# Altium footprint library Battery Holder.PcbLib: 4 footprints
Each footprint in its own frame and in the unit in brackets; x right, y up, seen from the top. Pads: shape width x height; smd on the part's side, far side on the other; paste and mask are expansions set on the pad; w line width, h text height; cw(c..) or ccw(c..) is an arc to the next point about the centre after c.
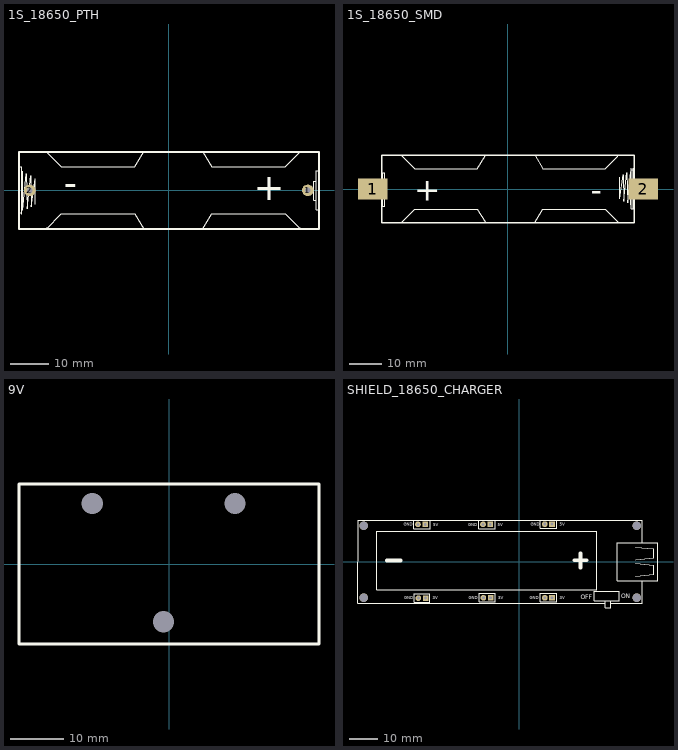
[diagram p0: the footprints below, top view; thin cyan lines are the x and y axes]

## 1S_18650_PTH [mm] "Battery 18650 Holder for 1 Cell, PTH Version"
pads (2):
  round 3 hole 1.5: 1(36.138,0.003) 2(-36.138,-0.003)
Top Overlay:
  lines w0.254: -38.74,-6.22 -38.74,6.099 -38.232,6.099 -38.232,-6.22 ; -38.74,-5.839 -38.232,-5.839 ; -37.978,4.956 -37.978,-5.204 -37.089,4.321 -36.835,-4.823 -35.819,3.813 -35.692,-4.315 -34.676,3.051 -34.676,-3.553 ; -31.755,-9.926 -27.945,-6.116 -8.851,-6.116 -6.482,-10.03 ; -31.755,9.933 -27.945,6.123 -8.851,6.123 -6.482,10.036 ; 8.802,-10.006 11.171,-6.093 30.265,-6.093 34.075,-9.903 ; 8.802,10.013 11.171,6.099 30.265,6.099 34.075,9.909 ; 37.714,-2.537 37.714,2.416 38.349,2.416 38.349,-2.537 37.714,-2.537 ; 38.349,-5.077 38.349,5.083 38.984,5.083 38.984,-5.077 38.349,-5.077
  lines w0.508: -31.755,-10.03 -31.755,-9.926 ; -31.755,9.933 -31.755,10.036 ; 34.075,-10.006 34.075,-9.903 ; 34.075,9.909 34.075,10.013 ; -38.932,-10.036 -38.932,10.03 39.046,10.03 39.046,-10.036 -38.932,-10.036
  text "-" at -23.737,3.747 h7
  text "+" at 30.111,3.446 h7
3D body "1s_18650_PTH.stp": height 21.5, standoff -3.99, extent -38.954,-10.003 39.046,9.997

## 1S_18650_SMD [mm] "Battery 18650 Holder for 1 Cell, SMD Version"
pads (2):
  rect 9x6.35 smd: 1(-41.33,0) 2(41.33,0)
Top Overlay:
  lines w0.254: -32.267,-10.073 -32.267,-9.969 -28.457,-6.159 -9.363,-6.159 -6.994,-10.073 ; -32.267,10.12 -32.267,10.016 -28.457,6.206 -9.363,6.206 -6.994,10.12 ; 8.29,-10.05 10.659,-6.136 29.753,-6.136 33.563,-9.946 33.563,-10.05 ; 8.29,10.097 10.659,6.183 29.753,6.183 33.563,9.993 33.563,10.097 ; 34.148,3.627 34.148,-2.977 35.164,4.389 35.291,-3.739 36.307,4.897 36.561,-4.247 37.45,5.278 37.45,-4.882 ; 37.704,5.913 38.212,5.913 ; 37.704,6.294 37.704,-6.025 38.212,-6.025 38.212,6.294 ; -38.242,-5.263 -37.607,-5.263 -37.607,4.897 -38.242,4.897 -38.242,-5.263 ; -37.607,-2.596 -36.972,-2.596 -36.972,2.357 -37.607,2.357 -37.607,-2.596
  lines w0.508: -38.525,-10.325 -38.525,10.325 38.525,10.325 38.525,-10.325 -38.525,-10.325
  text "-" at 25.245,-3.817 h7
  text "+" at -28.603,-3.516 h7
3D body "1s_18650_SMD.stp": height 16, standoff -3.3, extent -43.232,-10.448 43.208,10.352

## 9V [mil] "9V Battery Holder, Representative, no Connection to Board"
pads (3):
  round 80 hole 157.48 unplated: ""(-570.43,450.86) ""(-39.72,-429.06) ""(491.38,450.86)
Top Overlay:
  lines w20: -1115,-595 1115,-595 1115,595 -1115,595 -1115,-595
3D body "9V Battery Holder.SLDPRT": height 814.96, standoff 3.15, extent -1110,-590.55 1117.21,590.55

## SHIELD_18650_CHARGER [mm]
pads (16):
  rect 2x2 hole 1 paste-2539.97 mask+0.102: 1(11.469,13.121) 3(-10.115,13.043) 5(-32.848,13.043) 7(11.469,-12.606) 9(-9.988,-12.611) 11(-32.703,-12.733)
  round 2 hole 1 paste-2539.97 mask+0.102: 2(8.93,13.121) 4(-12.655,13.043) 6(-35.388,13.043) 8(8.93,-12.606) 10(-12.528,-12.611) 12(-35.243,-12.733)
  round 3 hole 3 unplated paste-2539.97: ""(-54.344,-12.567) ""(-54.344,12.567) ""(41.062,-12.567) ""(41.062,12.567)
Top Overlay:
  lines w0.154: -36.789,11.52 -31.089,11.52 -31.089,14.42 -36.789,14.42 -36.789,11.52 ; -36.644,-14.11 -31.197,-14.11 -31.197,-11.21 -36.644,-11.21 -36.644,-14.11 ; -14.162,11.52 -14.162,14.42 -8.455,14.42 -8.455,11.52 -14.162,11.52 ; -14.008,-13.988 -8.304,-13.988 -8.304,-11.088 -14.008,-11.088 -14.008,-13.988 ; 7.383,-13.983 13.126,-13.983 13.126,-11.083 7.383,-11.083 7.383,-13.983 ; 7.429,11.625 13.126,11.625 13.126,14.525 7.429,14.525 7.429,11.625
  lines w0.254: 29.883,-14.567 -56.344,-14.567 -56.343,14.567 43.062,14.567 43.062,6.672 43.047,6.656 ; 32.042,-14.567 43.047,-14.567 43.047,-6.61 ; 40.666,-5.044 47.016,-4.409 47.016,-1.234 40.666,-0.599 ; 40.666,0.671 47.016,1.306 47.016,4.481 40.666,5.116 ; -49.716,-9.879 -49.716,10.721 27.084,10.721 27.084,-9.879 -49.716,-9.879 ; 26.284,-13.706 34.884,-13.706 34.884,-10.406 26.284,-10.406 26.284,-13.706 ; 30.017,-16.167 30.017,-13.706 31.922,-13.706 31.922,-16.167 30.017,-16.167 ; 34.265,-6.568 48.489,-6.568 48.489,6.64 34.281,6.64 34.265,6.624 34.265,-6.568
  lines w1.254: -46.344,0.419 -41.443,0.419 ; 19.178,0.463 23.578,0.463 ; 21.405,-2.037 21.405,2.863
  text "5V" at 14.091,12.484 h1.02
  text "GND" at 4.058,12.484 h1.02
  text "GND" at -40.194,-13.185 h1.02
  text "3V" at -30.232,-13.17 h1.02
  text "3V" at -7.401,-13.061 h1.02
  text "GND" at -17.705,-13.062 h1.02
  text "GND" at -40.338,12.519 h1.02
  text "GND" at -17.777,12.406 h1.02
  text "5V" at -29.996,12.406 h1.02
  text "5V" at -7.49,12.406 h1.02
  text "ON" at 35.687,-12.827 h1.52
  text "OFF" at 21.443,-13.081 h1.52
  text "3V" at 14.218,-13.043 h1.02
  text "GND" at 3.622,-13.058 h1.02
3D body "18650_shield_charger.SLDPRT": height 23.06, standoff -6.22, extent -56.431,-16.267 48.618,14.636